# Altium schematic symbol library GD32L233RCT6.SchLib: 1 symbol
Pins are listed as number, name and electrical type; pins without a type are passive.

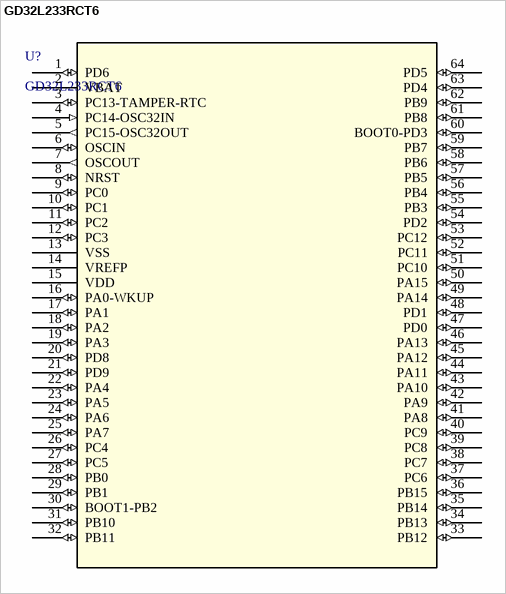
[diagram p0: symbol GD32L233RCT6]

## GD32L233RCT6
designator U?
Description; Manufacturer_Name: GigaDevice; Type: Embedded; Copyright: Copyright (C) 2025 Ultra Librarian. All rights reserved.; Manufacturer_Part_Number: GD32L233RCT6; RefDes: RefDes
footprint LQFP64_GDV
pins: 1 PD6 (io), 2 VBAT (power), 3 PC13-TAMPER-RTC (io), 4 PC14-OSC32IN (in), 5 PC15-OSC32OUT (out), 6 OSCIN (io), 7 OSCOUT (out), 8 NRST (io), 9 PC0 (io), 10 PC1 (io), 11 PC2 (io), 12 PC3 (io), 13 VSS (power), 14 VREFP (power), 15 VDD (power), 16 PA0-WKUP (io), 17 PA1 (io), 18 PA2 (io), 19 PA3 (io), 20 PD8 (io), 21 PD9 (io), 22 PA4 (io), 23 PA5 (io), 24 PA6 (io), 25 PA7 (io), 26 PC4 (io), 27 PC5 (io), 28 PB0 (io), 29 PB1 (io), 30 BOOT1-PB2 (io), 31 PB10 (io), 32 PB11 (io), 33 PB12 (io), 34 PB13 (io), 35 PB14 (io), 36 PB15 (io), 37 PC6 (io), 38 PC7 (io), 39 PC8 (io), 40 PC9 (io), 41 PA8 (io), 42 PA9 (io), 43 PA10 (io), 44 PA11 (io), 45 PA12 (io), 46 PA13 (io), 47 PD0 (io), 48 PD1 (io), 49 PA14 (io), 50 PA15 (io), 51 PC10 (io), 52 PC11 (io), 53 PC12 (io), 54 PD2 (io), 55 PB3 (io), 56 PB4 (io), 57 PB5 (io), 58 PB6 (io), 59 PB7 (io), 60 BOOT0-PD3 (io), 61 PB8 (io), 62 PB9 (io), 63 PD4 (io), 64 PD5 (io)